# Altium schematic symbol library EG1206.SchLib: 1 symbol
Pins are listed as number, name and electrical type; pins without a type are passive.

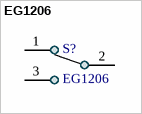
[diagram p0: symbol EG1206]

## EG1206
designator S?
Switch Slide SPDT Side Slide PC Pins Bracket Mount/Through Hole
footprint EG1206
pins: 1, 2, 3